# Altium footprint library Passives.PcbLib: 23 footprints (part 1 of 2)
Each footprint in its own frame and in the unit in brackets; x right, y up, seen from the top. Pads: shape width x height; smd on the part's side, far side on the other; paste and mask are expansions set on the pad; w line width, h text height; cw(c..) or ccw(c..) is an arc to the next point about the centre after c.
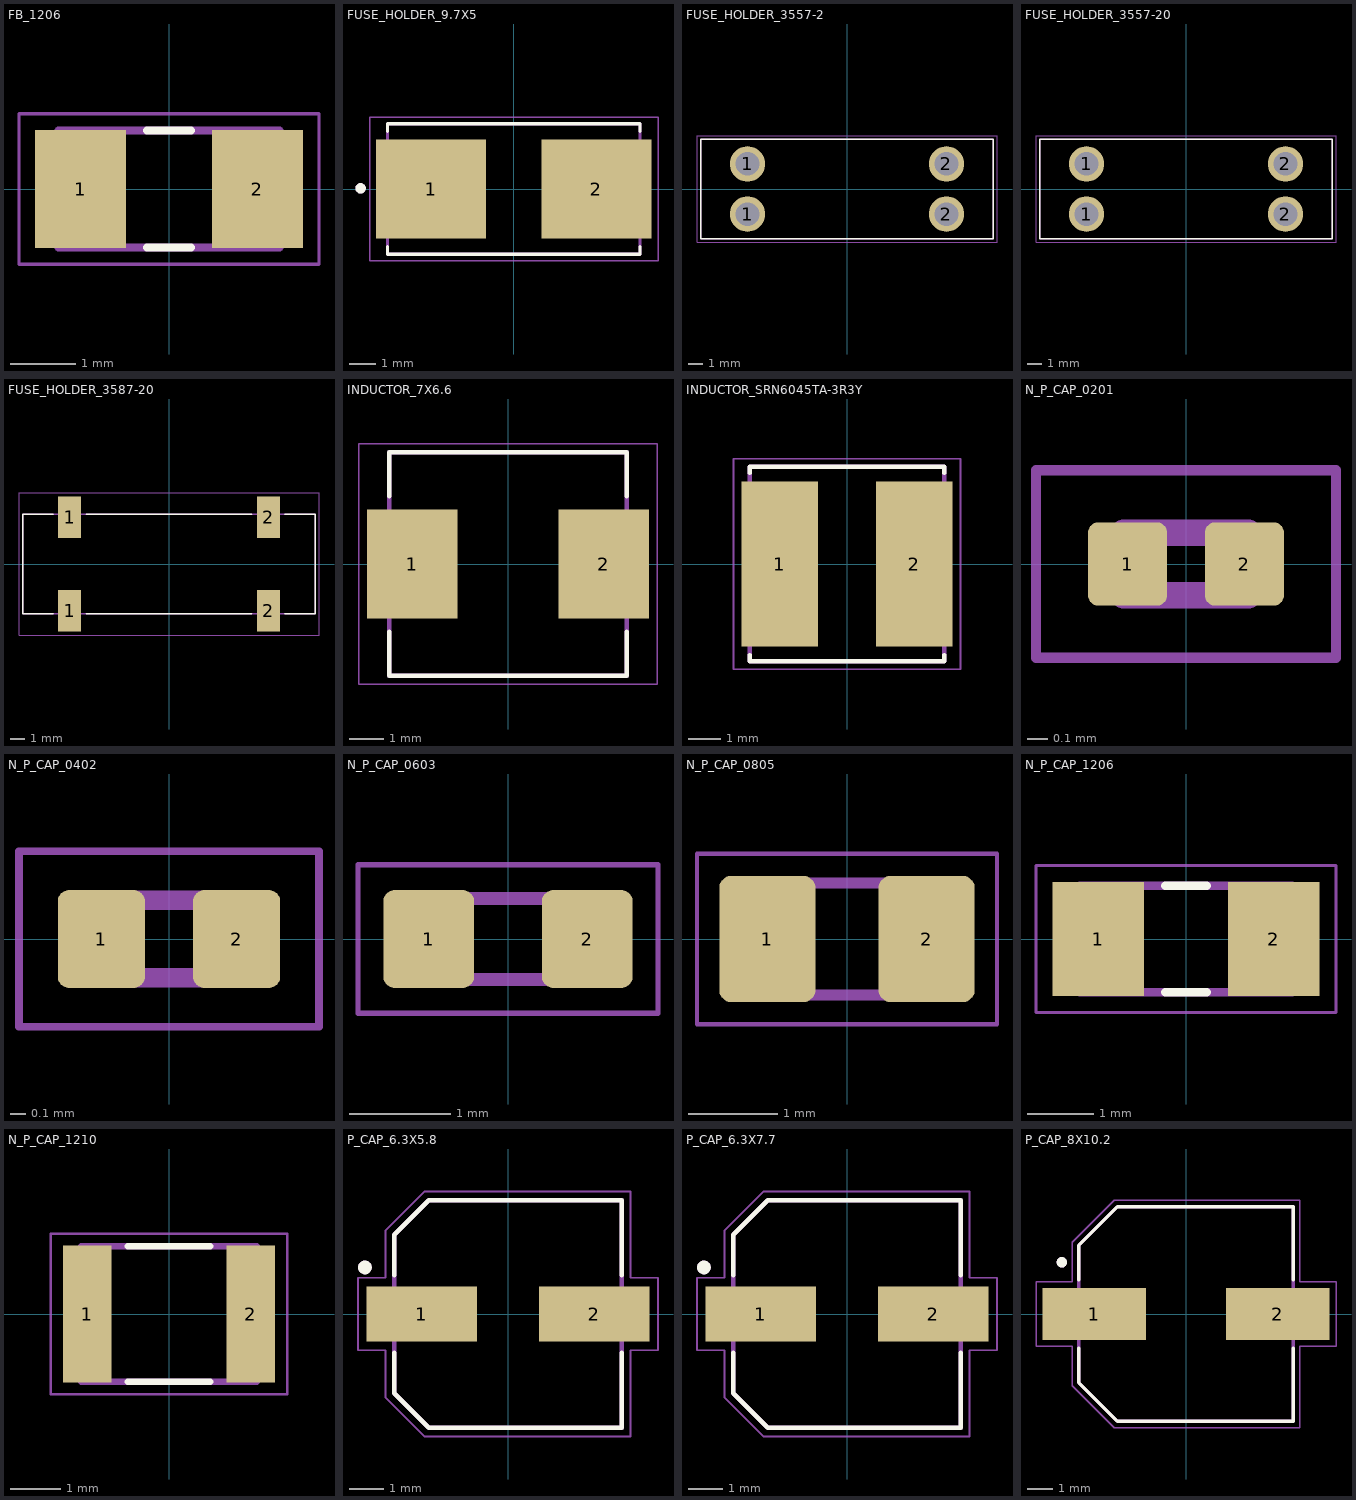
[diagram p0: the footprints below, top view; thin cyan lines are the x and y axes]

## FB_1206 [mm] "3216 Metric"
pads (2):
  rect 1.4x1.82 smd: 1(-1.36,0) 2(1.36,0)
Top Overlay:
  lines w0.127: -0.34,-0.9 0.34,-0.9 ; -0.34,0.9 0.34,0.9
Mechanical 13:
  lines w0.127: -1.7,-0.9 -1.7,0.9 1.7,0.9 1.7,-0.9 -1.7,-0.9
Mechanical 15:
  lines w0.05: -2.308,-1.158 -2.308,1.158 2.308,1.158 2.308,-1.158 -2.308,-1.158
3D body "BLM31KN121SN1L.STEP": height 1.61, standoff 0.01, extent -1.6,-0.9 1.6,0.9

## FUSE_HOLDER_9.7X5 [mil]
height 150
pads (2):
  rect 167x150 smd: 1(-125.5,0) 2(125.5,0)
Top Overlay:
  circle w7.87: c-232.37,1 r3.94
  lines w5: -191.5,-87.6 -191.5,-99 191.5,-99 191.5,-87.6 ; -191.5,87.6 -191.5,99 191.5,99 191.5,87.6
Mechanical 13:
  circle w7.87: c-232.37,1 r3.94
  lines w5: -191.5,-99 -191.5,99 191.5,99 191.5,-99 -191.5,-99
Mechanical 15:
  lines w1.97: -218.84,-108.84 218.84,-108.84 218.84,108.84 -218.84,108.84 -218.84,-108.84
3D body "step_temp.STEP": height 150, standoff 0, extent -191.54,-99.02 191.54,99.02

## FUSE_HOLDER_3557-2 [mm]
height 7.37
pads (4):
  round 2.4 hole 1.6: 1(-6.735,-1.7) 1(-6.735,1.7) 2(6.735,-1.7) 2(6.735,1.7)
Top Overlay:
  lines w0.127: -9.905,-3.365 -9.905,3.365 9.905,3.365 9.905,-3.365 -9.905,-3.365
Mechanical 13:
  lines w0.127: -9.905,-3.365 -9.905,3.365 9.905,3.365 9.905,-3.365 -9.905,-3.365
Mechanical 15:
  lines w0.05: -10.155,-3.615 10.155,-3.615 10.155,3.615 -10.155,3.615 -10.155,-3.615
3D body "step_temp.STEP": height 7.37, standoff -2.79, extent -9.905,-3.365 9.905,3.365

## FUSE_HOLDER_3557-20 [mm]
height 7.37
pads (4):
  round 2.4 hole 1.6: 1(-6.735,-1.7) 1(-6.735,1.7) 2(6.735,-1.7) 2(6.735,1.7)
Top Overlay:
  lines w0.127: -9.905,-3.365 -9.905,3.365 9.905,3.365 9.905,-3.365 -9.905,-3.365
Mechanical 13:
  lines w0.127: -9.905,-3.365 -9.905,3.365 9.905,3.365 9.905,-3.365 -9.905,-3.365
Mechanical 15:
  lines w0.05: -10.155,-3.615 10.155,-3.615 10.155,3.615 -10.155,3.615 -10.155,-3.615
3D body "step_temp.STEP": height 7.38, standoff -2.78, extent -9.779,-3.365 10.033,3.365

## FUSE_HOLDER_3587-20 [mm]
height 8.37
pads (4):
  rect 1.57x2.82 smd paste+0 mask+0.102: 1(-6.73,-3.16) 1(-6.73,3.16) 2(6.73,-3.16) 2(6.73,3.16)
Top Overlay:
  lines w0.127: -7.85,-3.365 -9.905,-3.365 -9.905,3.365 -7.85,3.365 ; -5.6,-3.365 5.6,-3.365 ; -5.6,3.365 5.6,3.365 ; 7.85,-3.365 9.905,-3.365 9.905,3.365 7.85,3.365
Mechanical 13:
  lines w0.127: -9.905,-3.365 9.905,-3.365 9.905,3.365 -9.905,3.365 -9.905,-3.365
Mechanical 15:
  lines w0.05: -10.155,-4.82 10.155,-4.82 10.155,4.82 -10.155,4.82 -10.155,-4.82
3D body "step_temp.STEP": height 7.88, standoff 0, extent -9.93,-4.368 9.882,4.388

## INDUCTOR_7X6.6 [mm]
height 3
pads (2):
  rect 2.67x3.21 smd: 1(-2.82,0) 2(2.82,0)
Top Overlay:
  lines w0.127: -3.5,-2 -3.5,-3.3 3.5,-3.3 3.5,-2 ; -3.5,2 -3.5,3.3 3.5,3.3 3.5,2
Mechanical 13:
  lines w0.127: -3.5,-3.3 -3.5,3.3 3.5,3.3 3.5,-3.3 -3.5,-3.3
Mechanical 15:
  lines w0.05: -4.405,-3.55 -4.405,3.55 4.405,3.55 4.405,-3.55 -4.405,-3.55

## INDUCTOR_SRN6045TA-3R3Y [mm]
pads (2):
  rect 2.35x5.1 smd: 1(-2.075,0) 2(2.075,0)
Top Overlay:
  lines w0.127: -3,-2.8 -3,-3 3,-3 3,-2.8 ; -3,2.8 -3,3 3,3 3,2.8
Mechanical 13:
  lines w0.127: -3,-3 3,-3 3,3 -3,3 -3,-3
Mechanical 15:
  lines w0.05: -3.5,-3.25 3.5,-3.25 3.5,3.25 -3.5,3.25 -3.5,-3.25
3D body "step_temp.STEP": height 4.5, standoff 0, extent -3,-3 3,3

## N_P_CAP_0201 [mm]
pads (2):
  rrect25% 0.38x0.4 smd paste+0 mask+0.102: 1(-0.281,0) 2(0.281,0)
Mechanical 13:
  lines w0.127: -0.3,-0.15 0.3,-0.15 0.3,0.15 -0.3,0.15 -0.3,-0.15
Mechanical 15:
  lines w0.05: -0.721,-0.45 0.721,-0.45 0.721,0.45 -0.721,0.45 -0.721,-0.45
3D body "step_temp.STEP": height 0.33, standoff 0, extent -0.3,-0.15 0.3,0.15

## N_P_CAP_0402 [mm]
pads (2):
  rrect25% 0.56x0.63 smd: 1(-0.435,0) 2(0.435,0)
Mechanical 13:
  lines w0.127: -0.5,-0.25 -0.5,0.25 0.5,0.25 0.5,-0.25 -0.5,-0.25
Mechanical 15:
  lines w0.05: -0.965,-0.565 -0.965,0.565 0.965,0.565 0.965,-0.565 -0.965,-0.565
3D body "step_temp.STEP": height 0.6, standoff 0, extent -0.5,-0.25 0.5,0.25

## N_P_CAP_0603 [mm]
pads (2):
  rrect25% 0.9x0.97 smd: 1(-0.785,0) 2(0.785,0)
Mechanical 13:
  lines w0.127: -0.8,-0.4 0.8,-0.4 0.8,0.4 -0.8,0.4 -0.8,-0.4
Mechanical 15:
  lines w0.05: -1.485,-0.735 1.485,-0.735 1.485,0.735 -1.485,0.735 -1.485,-0.735
3D body "step_temp.STEP": height 0.95, standoff 0, extent -0.8,-0.4 0.8,0.4

## N_P_CAP_0805 [mm]
pads (2):
  rrect25% 1.08x1.42 smd: 1(-0.895,0) 2(0.895,0)
Mechanical 13:
  lines w0.127: -1,-0.63 1,-0.63 1,0.63 -1,0.63 -1,-0.63
Mechanical 15:
  lines w0.05: -1.685,-0.96 1.685,-0.96 1.685,0.96 -1.685,0.96 -1.685,-0.96
3D body "step_temp.STEP": height 1.4, standoff 0, extent -1,-0.625 1,0.625

## N_P_CAP_1206 [mm]
pads (2):
  rect 1.38x1.71 smd: 1(-1.318,0) 2(1.318,0)
Top Overlay:
  lines w0.127: -0.31,-0.8 0.31,-0.8 ; -0.31,0.8 0.31,0.8
Mechanical 13:
  lines w0.127: -1.6,-0.8 -1.6,0.8 1.6,0.8 1.6,-0.8 -1.6,-0.8
Mechanical 15:
  lines w0.05: -2.256,-1.106 -2.256,1.106 2.256,1.106 2.256,-1.106 -2.256,-1.106
3D body "step_temp.STEP": height 1.8, standoff 0, extent -1.6,-0.8 1.6,0.8

## N_P_CAP_1210 [mm]
pads (2):
  rect 0.96x2.72 smd: 1(-1.625,0) 2(1.625,0)
Top Overlay:
  lines w0.127: -0.82,-1.35 0.82,-1.35 ; -0.82,1.35 0.82,1.35
Mechanical 13:
  lines w0.127: -1.75,-1.35 1.75,-1.35 1.75,1.35 -1.75,1.35 -1.75,-1.35
Mechanical 15:
  lines w0.05: -2.355,-1.6 2.355,-1.6 2.355,1.6 -2.355,1.6 -2.355,-1.6
3D body "step_temp.STEP": height 2.7, standoff 0, extent -1.6,-1.25 1.6,1.25

## P_CAP_6.3X5.8 [mm]
height 5.8
pads (2):
  rect 3.2x1.6 smd: 1(-2.5,0) 2(2.5,0)
Top Overlay:
  circle w0.2: c-4.15,1.35 r0.1
  lines w0.127: -3.3,-1.12 -3.3,-2.3 -2.3,-3.3 3.3,-3.3 3.3,-1.12 ; -3.3,1.12 -3.3,2.3 -2.3,3.3 3.3,3.3 3.3,1.12
Mechanical 13:
  circle w0.2: c-4.15,1.35 r0.1
  lines w0.127: -3.3,-2.3 -3.3,2.3 -2.3,3.3 3.3,3.3 3.3,-3.3 -2.3,-3.3 -3.3,-2.3
Mechanical 15:
  lines w0.05: -4.35,-1.05 -3.55,-1.05 -3.55,-2.425 -2.425,-3.55 3.55,-3.55 3.55,-1.05 4.35,-1.05 4.35,1.05 3.55,1.05 3.55,3.55 -2.425,3.55 -3.55,2.425 -3.55,1.05 -4.35,1.05 -4.35,-1.05
3D body "step_temp.STEP": height 5.8, standoff 0, extent -3.65,-3.3 3.65,3.3

## P_CAP_6.3X7.7 [mm]
height 7.7
pads (2):
  rect 3.2x1.6 smd paste+0 mask+0.102: 1(-2.5,0) 2(2.5,0)
Top Overlay:
  circle w0.2: c-4.15,1.35 r0.1
  lines w0.127: -3.3,-1.12 -3.3,-2.3 -2.3,-3.3 3.3,-3.3 3.3,-1.12 ; -3.3,1.12 -3.3,2.3 -2.3,3.3 3.3,3.3 3.3,1.12
Mechanical 13:
  circle w0.2: c-4.15,1.35 r0.1
  lines w0.127: -3.3,-2.3 -3.3,2.3 -2.3,3.3 3.3,3.3 3.3,-3.3 -2.3,-3.3 -3.3,-2.3
Mechanical 15:
  lines w0.05: -4.35,-1.05 -3.55,-1.05 -3.55,-2.425 -2.425,-3.55 3.55,-3.55 3.55,-1.05 4.35,-1.05 4.35,1.05 3.55,1.05 3.55,3.55 -2.425,3.55 -3.55,2.425 -3.55,1.05 -4.35,1.05 -4.35,-1.05
3D body "step_temp.STEP": height 7.7, standoff 0, extent -3.65,-3.3 3.65,3.3

## P_CAP_8X10.2 [mm]
height 10.2
pads (2):
  rect 4x2 smd: 1(-3.55,0) 2(3.55,0)
Top Overlay:
  circle w0.2: c-4.8,2 r0.1
  lines w0.127: -4.15,-1.32 -4.15,-2.65 -2.65,-4.15 4.15,-4.15 4.15,-1.32 ; -4.15,1.32 -4.15,2.65 -2.65,4.15 4.15,4.15 4.15,1.32
Mechanical 13:
  circle w0.2: c-4.8,2 r0.1
  lines w0.127: -4.15,-2.65 -4.15,2.65 -2.65,4.15 4.15,4.15 4.15,-4.15 -2.65,-4.15 -4.15,-2.65
Mechanical 15:
  lines w0.05: -5.8,-1.25 -4.4,-1.25 -4.4,-2.775 -2.775,-4.4 4.4,-4.4 4.4,-1.25 5.8,-1.25 5.8,1.25 4.4,1.25 4.4,4.4 -2.775,4.4 -4.4,2.775 -4.4,1.25 -5.8,1.25 -5.8,-1.25
3D body "step_temp.STEP": height 10.2, standoff 0, extent -4.85,-4.15 4.85,4.15